# Altium schematic symbol library Inductor.SchLib: 1 symbol
Pins are listed as number, name and electrical type; pins without a type are passive.

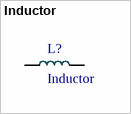
[diagram p0: symbol Inductor]

## Inductor
designator L?
Inductor with Inductance 6.8uH Tol.+/-20%; MP: LQM18DN6R8M70B; Package: None; Price: None; Value: *; Availability: Unavailable
footprint InductorPower3A
footprint SRR1260-330M (INDP125125X600N)
footprint Inductor0603 (InductorC1608X50N)
footprint Inductor1206 (Inductor3115X65N)
pins: 1, 2